# Altium footprint library CDSOD323-T12C.PcbLib: 3 footprints
Each footprint in its own frame and in the unit in brackets; x right, y up, seen from the top. Pads: shape width x height; smd on the part's side, far side on the other; paste and mask are expansions set on the pad; w line width, h text height; cw(c..) or ccw(c..) is an arc to the next point about the centre after c.
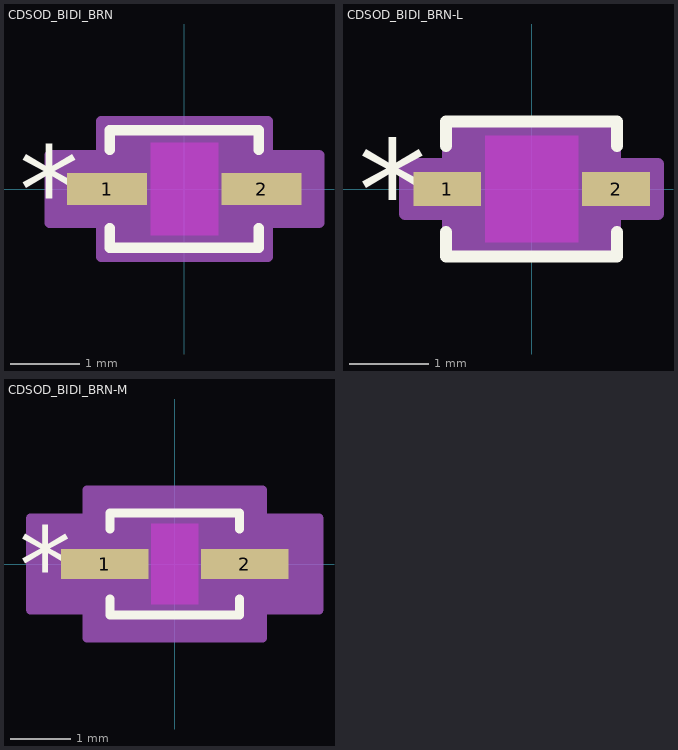
[diagram p0: the footprints below, top view; thin cyan lines are the x and y axes]

## CDSOD_BIDI_BRN [mil]
pads (2):
  rect 45.56x18.36 smd paste+0 mask+0: 1(-44,0) 2(44,0)
Top Overlay:
  lines w6: -42.5,-22.28 -42.5,-33.5 42.5,-33.5 42.5,-22.28 ; -42.5,22.28 -42.5,33.5 42.5,33.5 42.5,22.28
  text "*" at -94.28,-25 h50
  text ".Designator" at -137.5,-25 h50
Keep-Out Layer:
  region: -19.22,-26.5 -19.22,26.5 19.22,26.5 19.22,-26.5
Mechanical 13:
  lines w1: -37.5,-14.25 -23.25,-28.5 ; -37.5,14.25 -23.25,28.5 ; -53,-8 -37.5,-8 -37.5,8 -53,8 -53,-8 ; -37.5,-28.5 -37.5,28.5 37.5,28.5 37.5,-28.5 -37.5,-28.5 ; 37.5,-8 53,-8 53,8 37.5,8 37.5,-8
  text ".Designator" at -137.5,-25 h50
  text "*" at -40,-25 h50
Mechanical 15:
  region: -47.5,-19.18 -76.78,-19.18 -76.78,19.18 -47.5,19.18 -47.5,38.5 47.5,38.5 47.5,19.18 76.78,19.18 76.78,-19.18 47.5,-19.18 47.5,-38.5 -47.5,-38.5
  lines w6: -76.78,-19.18 -47.5,-19.18 -47.5,-38.5 47.5,-38.5 47.5,-19.18 76.78,-19.18 76.78,19.18 47.5,19.18 47.5,38.5 -47.5,38.5 -47.5,19.18 -76.78,19.18 -76.78,-19.18
3D body "CDSOD_BIDI_BRN.step": height 45.12, standoff 0, extent -52.99,-28.5 52.99,28.5

## CDSOD_BIDI_BRN-L [mil]
pads (2):
  rect 33.75x16.79 smd paste+0 mask+0: 1(-42.03,0) 2(42.03,0)
Top Overlay:
  lines w6: -42.5,-21.49 -42.5,-33.5 42.5,-33.5 42.5,-21.49 ; -42.5,21.49 -42.5,33.5 42.5,33.5 42.5,21.49
  text ".Designator" at -137.5,-25 h50
  text "*" at -86.41,-25 h50
Keep-Out Layer:
  region: -23.16,-26.5 -23.16,26.5 23.16,26.5 23.16,-26.5
Mechanical 13:
  lines w1: -37.5,-14.25 -23.25,-28.5 ; -37.5,14.25 -23.25,28.5 ; -53,-8 -53,8 -37.5,8 -37.5,-8 -53,-8 ; -37.5,-28.5 37.5,-28.5 37.5,28.5 -37.5,28.5 -37.5,-28.5 ; 37.5,-8 37.5,8 53,8 53,-8 37.5,-8
  text "*" at -40,-25 h50
  text ".Designator" at -137.5,-25 h50
Mechanical 15:
  region: -41.5,-12.39 -62.91,-12.39 -62.91,12.39 -41.5,12.39 -41.5,32.5 41.5,32.5 41.5,12.39 62.91,12.39 62.91,-12.39 41.5,-12.39 41.5,-32.5 -41.5,-32.5
  lines w6: -62.91,-12.39 -62.91,12.39 -41.5,12.39 -41.5,32.5 41.5,32.5 41.5,12.39 62.91,12.39 62.91,-12.39 41.5,-12.39 41.5,-32.5 -41.5,-32.5 -41.5,-12.39 -62.91,-12.39
3D body "CDSOD_BIDI_BRN.step": height 45.12, standoff 0, extent -52.99,-28.5 52.99,28.5

## CDSOD_BIDI_BRN-M [mil]
pads (2):
  rect 57.37x19.94 smd paste+0 mask+0: 1(-45.97,0) 2(45.97,0)
Top Overlay:
  lines w6: -42.5,-23.07 -42.5,-33.5 42.5,-33.5 42.5,-23.07 ; -42.5,23.07 -42.5,33.5 42.5,33.5 42.5,23.07
  text ".Designator" at -137.5,-25 h50
  text "*" at -102.15,-25 h50
Keep-Out Layer:
  region: -15.28,-26.5 -15.28,26.5 15.28,26.5 15.28,-26.5
Mechanical 13:
  lines w1: -37.5,-14.25 -23.25,-28.5 ; -37.5,14.25 -23.25,28.5 ; -53,-8 -53,8 -37.5,8 -37.5,-8 -53,-8 ; -37.5,-28.5 37.5,-28.5 37.5,28.5 -37.5,28.5 -37.5,-28.5 ; 37.5,-8 37.5,8 53,8 53,-8 37.5,-8
  text "*" at -40,-25 h50
  text ".Designator" at -137.5,-25 h50
Mechanical 15:
  region: -57.5,-29.97 -94.65,-29.97 -94.65,29.97 -57.5,29.97 -57.5,48.5 57.5,48.5 57.5,29.97 94.65,29.97 94.65,-29.97 57.5,-29.97 57.5,-48.5 -57.5,-48.5
  lines w6: -94.65,-29.97 -94.65,29.97 -57.5,29.97 -57.5,48.5 57.5,48.5 57.5,29.97 94.65,29.97 94.65,-29.97 57.5,-29.97 57.5,-48.5 -57.5,-48.5 -57.5,-29.97 -94.65,-29.97
3D body "CDSOD_BIDI_BRN.step": height 45.12, standoff 0, extent -52.99,-28.5 52.99,28.5